# Altium footprint library PcbLib_Source_IoT.PcbLib: 49 footprints (part 1 of 4)
Each footprint in its own frame and in the unit in brackets; x right, y up, seen from the top. Pads: shape width x height; smd on the part's side, far side on the other; paste and mask are expansions set on the pad; w line width, h text height; cw(c..) or ccw(c..) is an arc to the next point about the centre after c.
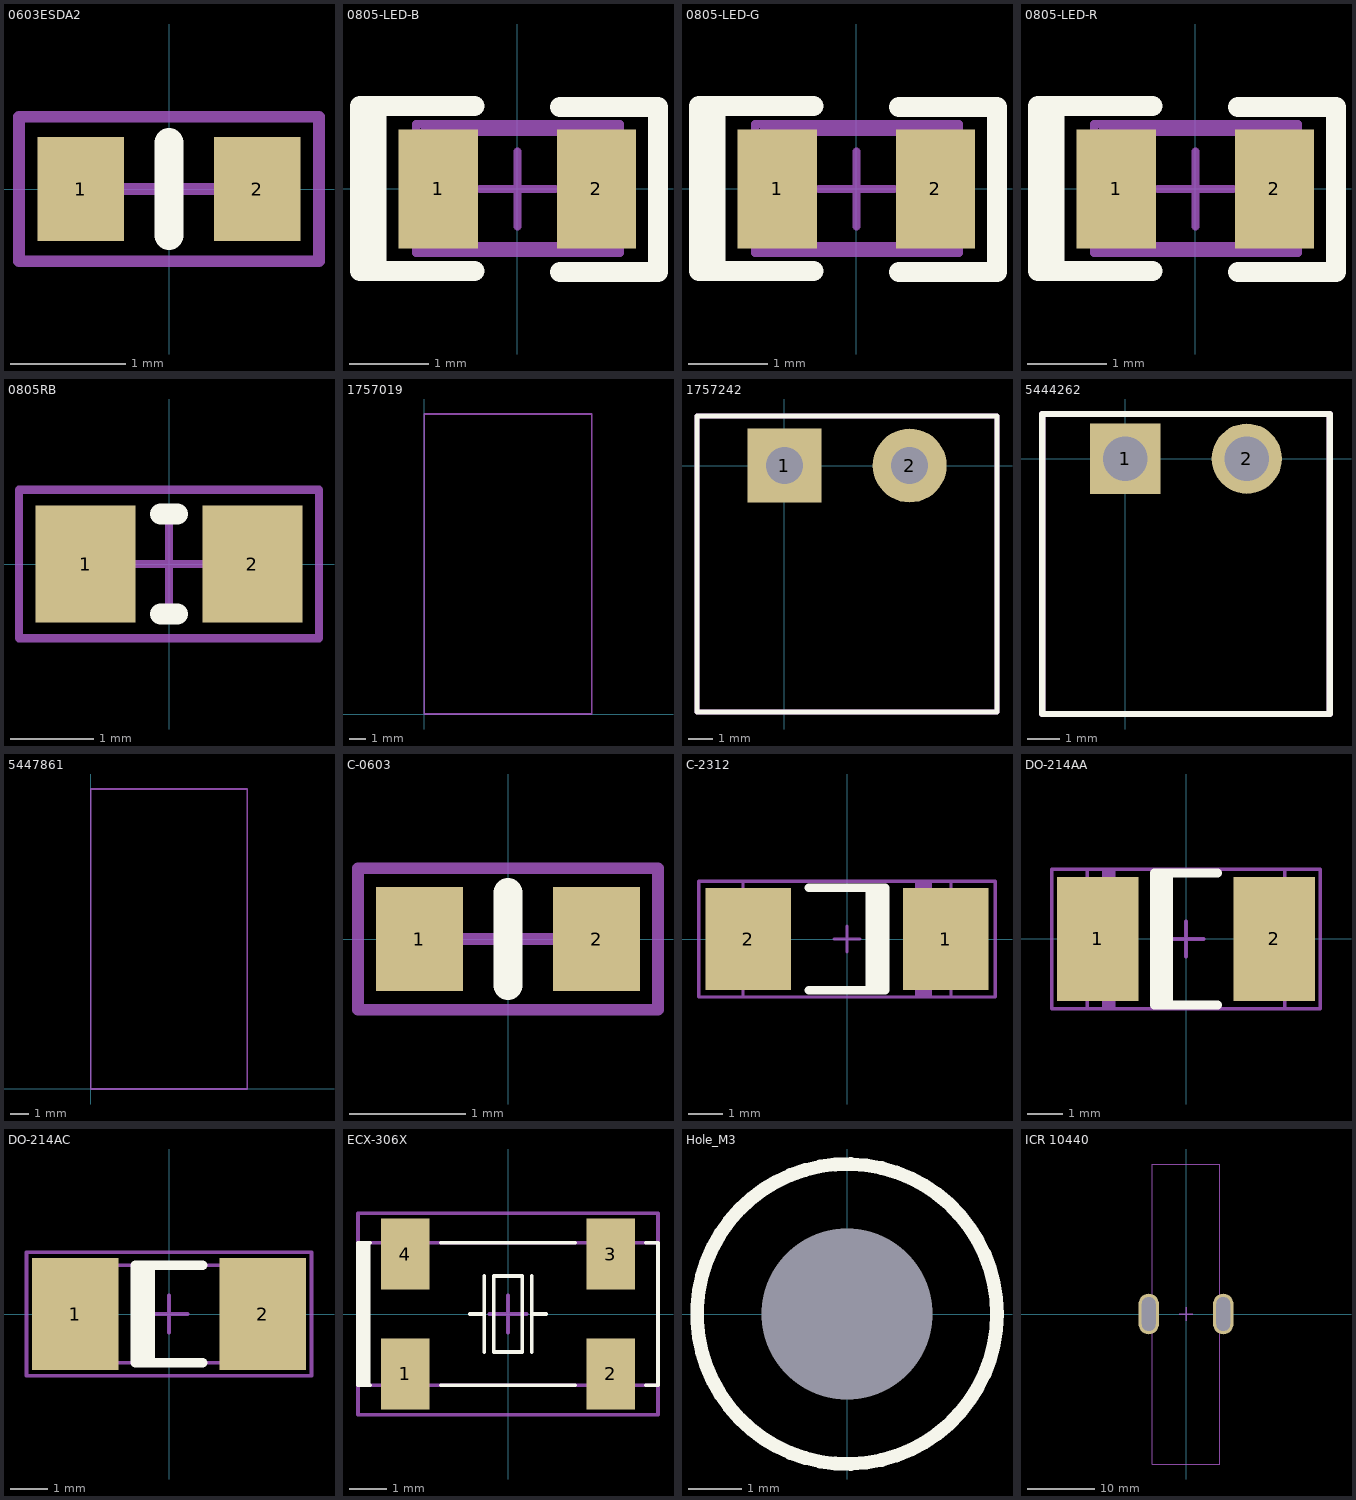
[diagram p0: the footprints below, top view; thin cyan lines are the x and y axes]

## 0603ESDA2 [mm]
pads (2):
  rect 0.75x0.9 smd mask+0.1: 1(-0.765,0) 2(0.765,0)
Top Overlay:
  lines w0.254: 0,-0.4 0,0.4
Top Assembly:
  lines w0.1: -1.3,-0.625 1.3,-0.625 1.3,0.625 -1.3,0.625 -1.3,-0.625
  text "'.Designator'" at -0.975,-0.371 h1.2
Mechanical:
  lines w0.1: -0.375,0 0.375,0 ; 0,-0.375 0,0.375 ; -1.3,-0.625 1.3,-0.625 1.3,0.625 -1.3,0.625 -1.3,-0.625
3D body "User Library-0603ESDA.STEP": height 0.61, standoff 0.01, extent -0.85,-0.425 0.85,0.425

## 0805-LED-B [mm]
height 0.9
pads (2):
  rect 1x1.5 smd: 1(-1,0) 2(1,0)
Top Overlay:
  rectangle: -2.015,-0.96 -1.655,1.05
  lines w0.254: -0.54,-1.04 -1.99,-1.04 -1.99,1.05 -0.54,1.05 ; 0.54,-1.05 1.78,-1.05 1.78,1.04 0.54,1.04
Mechanical:
  lines w0.1: -0.475,0 0.475,0 ; 0,-0.475 0,0.475 ; -1.28,-0.81 1.3,-0.81 1.3,0.82 -1.28,0.82 -1.28,-0.81
Top Assembly (Mech29):
  lines w0.1: -1.2,-0.72 -1.2,0.72 1.23,0.72 1.23,-0.72 -1.2,-0.72
  text "'.Designator'" at -0.975,-0.371 h1.2
3D body "User Library-led_0805LED0805_blue.STEP": height 1.1, standoff 0, extent -1.01,-0.625 1.01,0.625

## 0805-LED-G [mm]
height 0.9
pads (2):
  rect 1x1.5 smd: 1(-1,0) 2(1,0)
Top Overlay:
  rectangle: -2.015,-0.96 -1.655,1.05
  lines w0.254: -0.54,-1.04 -1.99,-1.04 -1.99,1.05 -0.54,1.05 ; 0.54,-1.05 1.78,-1.05 1.78,1.04 0.54,1.04
Mechanical:
  lines w0.1: -0.475,0 0.475,0 ; 0,-0.475 0,0.475 ; -1.28,-0.81 1.3,-0.81 1.3,0.82 -1.28,0.82 -1.28,-0.81
Top Assembly (Mech29):
  lines w0.1: -1.2,-0.72 -1.2,0.72 1.23,0.72 1.23,-0.72 -1.2,-0.72
  text "'.Designator'" at -0.975,-0.371 h1.2
3D body "User Library-User Library-led_0805 GRE.STEP": height 1.1, standoff 0, extent -1.01,-0.605 1.01,0.645

## 0805-LED-R [mm]
height 0.9
pads (2):
  rect 1x1.5 smd: 1(-1,0) 2(1,0)
Top Overlay:
  rectangle: -2.015,-0.96 -1.655,1.05
  lines w0.254: -0.54,-1.04 -1.99,-1.04 -1.99,1.05 -0.54,1.05 ; 0.54,-1.05 1.78,-1.05 1.78,1.04 0.54,1.04
Mechanical:
  lines w0.1: -0.475,0 0.475,0 ; 0,-0.475 0,0.475 ; -1.28,-0.81 1.3,-0.81 1.3,0.82 -1.28,0.82 -1.28,-0.81
Top Assembly (Mech29):
  lines w0.1: -1.2,-0.72 -1.2,0.72 1.23,0.72 1.23,-0.72 -1.2,-0.72
  text "'.Designator'" at -0.975,-0.371 h1.2
3D body "User Library-led_0805LED0805_red.STEP": height 1.1, standoff 0, extent -1.01,-0.605 1.01,0.645

## 0805RB [mm]
pads (2):
  rect 1.2x1.4 smd: 1(-1,0) 2(1,0)
Top Overlay:
  lines w0.254: -0.1,-0.6 0.1,-0.6 ; -0.1,0.6 0.1,0.6
Mechanical:
  lines w0.1: -0.5,0 0.5,0 ; 0,-0.5 0,0.5 ; -1.8,-0.889 1.8,-0.889 1.8,0.889 -1.8,0.889 -1.8,-0.889
Top Assembly (Mech29):
  lines w0.1: -1.8,-0.889 1.8,-0.889 1.8,0.889 -1.8,0.889 -1.8,-0.889
  text "'.Designator'" at -0.75,-0.35 h1.2
3D body "Coilcraft-0805RB.step": height 1.52, standoff 0, extent -1.145,-0.865 1.145,0.865

## 1757019 [mm]
Mechanical:
  lines w0.1: 0,0 10.225,0 10.225,18.3 0,18.3 0,0
Top Assembly (Mech29):
  lines w0.1: 0,0 10.225,0 10.225,18.3 0,18.3 0,0
  text "'.Designator'" at 4.714,11.969 h1.5
3D body "pxc_1757019_06_MSTB-2-5-2-ST-5-08_3D.stp": height 15.2, standoff 0.2, extent 0,0 10.22,18.3

## 1757242 [mm]
pads (2):
  rect 3x3 hole 1.5: 1(0,0)
  round 3 hole 1.5: 2(5.08,0)
Top Overlay:
  lines w0.2: -3.54,-9.993 8.62,-9.993 8.62,2.009 -3.54,2.009 -3.54,-9.993
Mechanical:
  lines w0.2: -3.54,-9.993 -3.54,2.009 8.62,2.009 8.62,-9.993 -3.54,-9.993
Top Assembly (Mech29):
  lines w0.2: -3.54,-9.993 8.62,-9.993 8.62,2.009 -3.54,2.009 -3.54,-9.993
  text "'.Designator'" at 1.789,-4.331 h1.5
3D body "pxc_1757242_06_MSTBA-2-5-2-G-5-08_3D.stp": height 8.7, standoff -3.4, extent -3.54,-9.993 8.62,2.009

## 5444262 [mm]
pads (2):
  rect 2.2x2.2 hole 1.4: 1(0,0)
  round 2.2 hole 1.4: 2(3.81,0)
Top Overlay:
  lines w0.2: -2.6,-8 6.41,-8 6.41,1.4 -2.6,1.4 -2.6,-8
Mechanical:
  lines w0.2: 6.4,-8 -2.6,-8 -2.6,1.4 6.41,1.4 6.41,-8
Top Assembly (Mech29):
  lines w0.2: -2.6,-8 6.41,-8 6.41,1.4 -2.6,1.4 -2.6,-8
  text "'.Designator'" at 1.789,-4.331 h1.5
3D body "pxc_1803277_05_MC-1-5-2-G-3-81_3D.stp": height 7.25, standoff -3.4, extent -2.6,-7.95 6.41,1.35

## 5447861 [mm]
Mechanical:
  lines w0.1: 0,0 8.4,0 8.4,16.1 0,16.1 0,0
Top Assembly (Mech29):
  lines w0.1: 0,0 8.4,0 8.4,16.1 0,16.1 0,0
  text "'.Designator'" at 3.014,11.969 h1.5
3D body "pxc_1803578_07_MC-1-5-2-ST-3-81_3D.stp": height 7.7, standoff -3.4, extent 0,0 8.41,16.1

## C-0603 [mm]
pads (2):
  rect 0.75x0.9 smd mask+0.1: 1(-0.765,0) 2(0.765,0)
Top Overlay:
  lines w0.254: 0,-0.4 0,0.4
Mechanical:
  lines w0.1: -0.375,0 0.375,0 ; 0,-0.375 0,0.375 ; -1.295,-0.61 -1.295,0.61 1.295,0.61 1.295,-0.61 -1.295,-0.61
Top Assembly (Mech29):
  lines w0.1: -1.295,-0.61 -1.295,0.61 1.295,0.61 1.295,-0.61 -1.295,-0.61
  text "'.Designator'" at -0.975,-0.371 h1.2
3D body "User Library-Chip Capacitor2.step": height 0.8, standoff 0, extent -0.8,-0.43 0.8,0.43

## C-2312 [mm]
pads (2):
  rect 2.5x3 smd mask+0.1: 1(2.9,0) 2(-2.9,0)
Top Overlay:
  lines w0.254: -1.125,-1.5 1.125,-1.5 1.125,1.5 -1.125,1.5 ; 0.675,-1.5 0.675,1.5 ; 0.9,-1.5 0.9,1.5
Mechanical:
  lines w0.1: -0.375,0 0.375,0 ; 0,-0.375 0,0.375 ; -4.35,-1.7 4.35,-1.7 4.35,1.7 -4.35,1.7 -4.35,-1.7
Top Assembly (Mech29):
  region: 2.5,1.7 2,1.7 2,-1.7 2.5,-1.7
  lines w0.1: -3.05,-1.7 3.05,-1.7 3.05,1.7 -3.05,1.7 -3.05,-1.7
  text "'.Designator'" at 0.975,0.371 h1.2
3D body "User Library-AVX_C_CASE.step": height 2.7, standoff 0, extent -3.05,-1.675 3.05,1.675

## DO-214AA [mm]
pads (2):
  rect 2.3x3.5 smd mask+0.1: 1(-2.5,0) 2(2.5,0)
Top Overlay:
  rectangle: -0.9,-2 -0.5,2
  lines w0.254: -0.5,-1.875 -0.5,1.875 ; 0.9,-1.875 -0.9,-1.875 -0.9,1.875 0.9,1.875
Mechanical:
  lines w0.1: -0.5,0 0.5,0 ; 0,-0.5 0,0.5 ; -3.8,-1.975 3.8,-1.975 3.8,1.975 -3.8,1.975 -3.8,-1.975
Top Assembly (Mech29):
  rectangle: -2.375,-1.975 -2,1.975
  lines w0.1: -2.8,-1.975 -2.8,1.975 2.8,1.975 2.8,-1.975 -2.8,-1.975
  text "'.Designator'" at -0.975,-0.375 h1.5
3D body "User Library-DO-214AA(SMB).step": height 2.65, standoff 0, extent -2.794,-1.975 2.794,1.975

## DO-214AC [mm]
pads (2):
  rect 2.3x3 smd mask+0.1: 1(-2.5,0) 2(2.5,0)
Top Overlay:
  rectangle: -0.9,-1.3 -0.5,1.3
  lines w0.254: -0.5,-1.3 -0.5,1.3 ; 0.9,-1.3 -0.9,-1.3 -0.9,1.3 0.9,1.3
Mechanical:
  lines w0.1: -0.5,0 0.5,0 ; 0,-0.5 0,0.5 ; -3.8,-1.65 3.8,-1.65 3.8,1.65 -3.8,1.65 -3.8,-1.65
Top Assembly (Mech29):
  rectangle: -1.975,-1.3 -1.6,1.3
  lines w0.1: -2.6,-1.3 -2.6,1.3 2.6,1.3 2.6,-1.3 -2.6,-1.3
  text "'.Designator'" at -0.975,-0.375 h1.5
3D body "User Library-DO-214AC SMA.step": height 2.4, standoff 0, extent -2.6,-1.3 2.6,1.3

## ECX-306X [mm]
pads (4):
  rect 1.3x1.9 smd mask+0.1: 1(-2.75,-1.6) 2(2.75,-1.6) 3(2.75,1.6) 4(-2.75,1.6)
Top Overlay:
  rectangle: -4.013,-1.905 -3.683,1.905
  lines w0.1: -3.683,-1.905 -4.013,-1.905 -4.013,1.905 -3.683,1.905 ; -1.8,-1.905 1.8,-1.905 ; -1.8,1.905 1.8,1.905 ; -1.016,0 -0.635,0 ; -0.635,-1.016 -0.635,1.016 ; 0.635,-1.016 0.635,1.016 ; 0.635,0 1.016,0 ; 3.683,-1.905 4.013,-1.905 4.013,1.905 3.683,1.905 ; -0.381,-1.016 0.381,-1.016 0.381,1.016 -0.381,1.016 -0.381,-1.016
Mechanical:
  lines w0.1: -0.5,0 0.5,0 ; 0,-0.5 0,0.5 ; -4.013,-2.692 4.013,-2.692 4.013,2.692 -4.013,2.692 -4.013,-2.692
Top Assembly (Mech29):
  lines w0.1: -4.013,-1.905 4.013,-1.905 4.013,1.905 -4.013,1.905 -4.013,-1.905
  text "'.Designator'" at -1.88,-0.381 h1.5
3D body "User Library-ZM206.step": height 2.53, standoff 0, extent -4,-1.9 4,1.9

## Hole_M3 [mm]
pads (1):
  round 0 hole 3.2: 1(0,0)
Top Overlay:
  circle w0.254: c0,0 r2.8
Bottom Overlay:
  circle w0.254: c0,0 r2.8

## ICR 10440 [mm]
pads (2):
  oval 3x6 hole 5 slot 2 at 0 deg: ""(-5.5,0) ""(5.5,0)
Mechanical:
  lines w0.1: -5,-22.15 5,-22.15 5,22.15 -5,22.15 -5,-22.15
  lines w0.2: -1,0 1,0 ; 0,-1 0,1
Top Assembly (Mech29):
  lines w0.1: -5,-22.15 5,-22.15 5,22.15 -5,22.15 -5,-22.15
  text "'.Designator'" at -1.725,-0.425 h1.5
3D body "User Library-li-ion (1).step": height 11.5, standoff 1.5, extent -5,-22.15 5,22.15